# Altium footprint library MODULE_ESP32-S3-DEVKITC-1U-N8R8.PcbLib: 1 footprints
Each footprint in its own frame and in the unit in brackets; x right, y up, seen from the top. Pads: shape width x height; smd on the part's side, far side on the other; paste and mask are expansions set on the pad; w line width, h text height; cw(c..) or ccw(c..) is an arc to the next point about the centre after c.
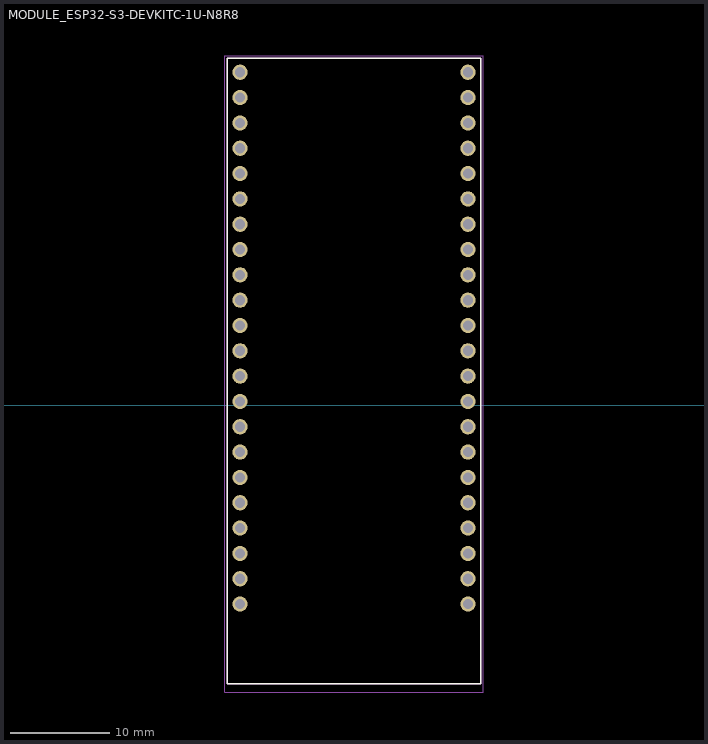
[diagram p0: the footprint, top view; thin cyan lines are the x and y axes]

## MODULE_ESP32-S3-DEVKITC-1U-N8R8 [mm]
height 7.39
pads (44):
  round 1.53 hole 1.02 mask+0.102: J1_1(-128.651,33.399) J1_2(-128.651,30.859) J1_3(-128.651,28.319) J1_4(-128.651,25.779) J1_5(-128.651,23.239) J1_6(-128.651,20.699) J1_7(-128.651,18.159) J1_8(-128.651,15.619) J1_9(-128.651,13.079) J1_10(-128.651,10.539) J1_11(-128.651,7.999) J1_12(-128.651,5.459) J1_13(-128.651,2.919) J1_14(-128.651,0.379) J1_15(-128.651,-2.161) J1_16(-128.651,-4.701) J1_17(-128.651,-7.241) J1_18(-128.651,-9.781) J1_19(-128.651,-12.321) J1_20(-128.651,-14.861) J1_21(-128.651,-17.401) J1_22(-128.651,-19.941) J3_1(-105.791,33.399) J3_2(-105.791,30.859) J3_3(-105.791,28.319) J3_4(-105.791,25.779) J3_5(-105.791,23.239) J3_6(-105.791,20.699) J3_7(-105.791,18.159) J3_8(-105.791,15.619) J3_9(-105.791,13.079) J3_10(-105.791,10.539) J3_11(-105.791,7.999) J3_12(-105.791,5.459) J3_13(-105.791,2.919) J3_14(-105.791,0.379) J3_15(-105.791,-2.161) J3_16(-105.791,-4.701) J3_17(-105.791,-7.241) J3_18(-105.791,-9.781) J3_19(-105.791,-12.321) J3_20(-105.791,-14.861) J3_21(-105.791,-17.401) J3_22(-105.791,-19.941)
Top Overlay:
  lines w0.127: -129.921,-27.941 -129.921,34.799 -104.521,34.799 -104.521,-27.941 -129.921,-27.941
Assembly Top:
  lines w0.127: -129.921,-27.941 -129.921,34.799 -104.521,34.799 -104.521,-27.941 -129.921,-27.941
  text "J1" at -127.221,32.929 h1.27
  text "J3" at -108.971,32.929 h1.27
Courtyard Top:
  lines w0.05: -130.171,-28.781 -130.171,35.049 -104.271,35.049 -104.271,-28.781 -130.171,-28.781
3D body "step_temp.STEP": height 7.49, standoff -6, extent -129.921,-28.531 -104.521,34.799